# EAGLE library part LT8711EFE#TRPBF (library LT8711EFE#TRPBF)
Micropower Synchronous Multitopology Controller with 42V Input Capability Source: Datasheet <https://www.analog.com/LT8711/datasheet>
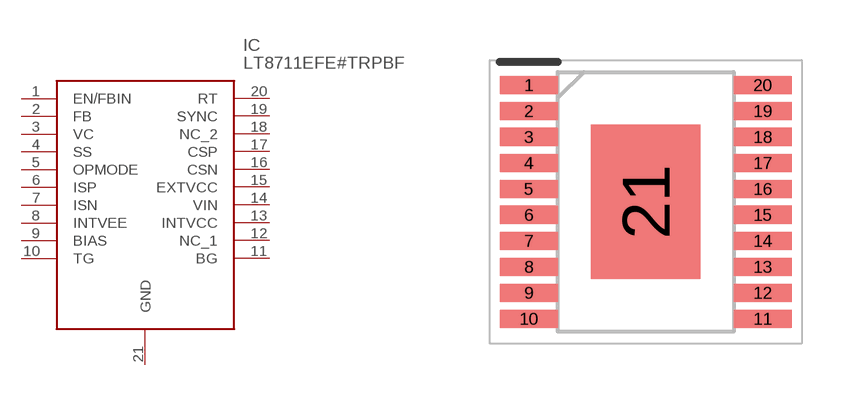
[diagram p0: symbol with the pads of SOP65P640X120-21N; footprint SOP65P640X120-21N]

Designator prefix IC

## LT8711EFE#TRPBF (Arrow_Part_Number: LT8711EFE#TRPBF; Arrow_Price-Stock: https://www.arrow.com/en/products/lt8711efetrpbf/analog-devices?region=nac; Description: Micropower Synchronous Multitopology Controller with 42V Input Capability; Height: 1.2mm; Manufacturer_Name: Analog Devices; Manufacturer_Part_Number: LT8711EFE#TRPBF; Mouser_Part_Number: 584-LT8711EFETRPBF; Mouser_Price-Stock: https://www.mouser.co.uk/ProductDetail/Analog-Devices/LT8711EFETRPBF?qs=YCa%2FAAYMW03ypo7nngD4zA%3D%3D)  [SOP65P640X120-21N]
1  EN/FBIN
2  FB
3  VC
4  SS
5  OPMODE
6  ISP
7  ISN
8  INTVEE
9  BIAS
10  TG
11  BG
12  NC_1
13  INTVCC
14  VIN
15  EXTVCC
16  CSN
17  CSP
18  NC_2
19  SYNC
20  RT
21  GND

## Footprint SOP65P640X120-21N (pad centres in mm)
FE Package 20-Lead Plastic TSSOP (4.4mm
smd 1.45 x 0.45: 1 -2.925,2.925; 2 -2.925,2.275; 3 -2.925,1.625; 4 -2.925,0.975; 5 -2.925,0.325; 6 -2.925,-0.325; 7 -2.925,-0.975; 8 -2.925,-1.625; 9 -2.925,-2.275; 10 -2.925,-2.925; 11 2.925,-2.925; 12 2.925,-2.275; 13 2.925,-1.625; 14 2.925,-0.975; 15 2.925,-0.325; 16 2.925,0.325; 17 2.925,0.975; 18 2.925,1.625; 19 2.925,2.275; 20 2.925,2.925
smd 2.74 x 3.86: 21 0,0